# Altium footprint library AVP32F08_EVM_Rev1.1.PcbLib: 50 footprints (part 4 of 4)
Each footprint in its own frame and in the unit in brackets; x right, y up, seen from the top. Pads: shape width x height; smd on the part's side, far side on the other; paste and mask are expansions set on the pad; w line width, h text height; cw(c..) or ccw(c..) is an arc to the next point about the centre after c.
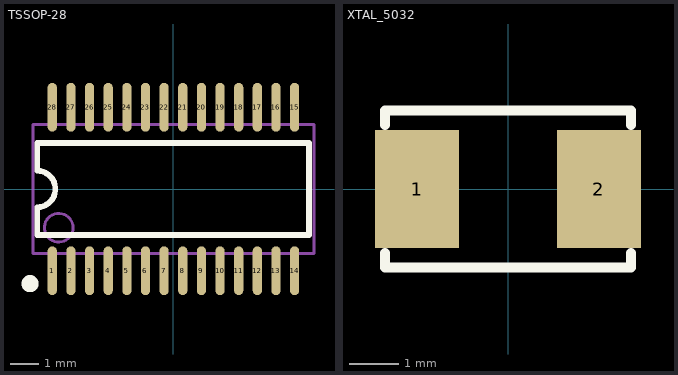
[diagram p3: the footprints below, top view; thin cyan lines are the x and y axes]

## TSSOP-28 [mm] "Wb=4,4mm, Wl=6,4mm, L=9,7mm, H=1,1mm, P=0,65"
height 8
pads (28):
  oval 0.32x1.7 smd: 1(-4.225,-2.85) 2(-3.575,-2.85) 3(-2.925,-2.85) 4(-2.275,-2.85) 5(-1.625,-2.85) 6(-0.975,-2.85) 7(-0.325,-2.85) 8(0.325,-2.85) 9(0.975,-2.85) 10(1.625,-2.85) 11(2.275,-2.85) 12(2.925,-2.85) 13(3.575,-2.85) 14(4.225,-2.85) 15(4.225,2.85) 16(3.575,2.85) 17(2.925,2.85) 18(2.275,2.85) 19(1.625,2.85) 20(0.975,2.85) 21(0.325,2.85) 22(-0.325,2.85) 23(-0.975,2.85) 24(-1.625,2.85) 25(-2.275,2.85) 26(-2.925,2.85) 27(-3.575,2.85) 28(-4.225,2.85)
Top Overlay:
  circle w0.3: c-5,-3.3 r0.15
  lines w0.2: -4.75,-0.635 ccw(c-4.75,0) -4.75,0.635
  lines w0.203: -4.75,-1.6 4.724,-1.6 4.724,1.6 -4.75,1.6 -4.75,0.65 ; -4.75,-1.587 -4.75,-0.65
Mechanical 13:
  circle w0.1: c-4,-1.35 r0.5
  lines w0.1: -4.9,-2.25 -4.9,2.25 4.9,2.25 4.9,-2.25 -4.9,-2.25
3D body "User Library-TSSOP-28.STEP": height 1.2, standoff 0, extent -4.85,-3.2 4.85,3.2

## XTAL_5032 [mm] "5032晶振"
height 1.2
pads (2):
  rect 1.7x2.4 smd: 1(-1.85,0) 2(1.85,0)
Top Overlay:
  lines w0.203: -2.5,-1.3 -2.5,-1.6 2.5,-1.6 2.5,-1.3 ; -2.5,1.3 -2.5,1.6 2.5,1.6 2.5,1.3
3D body "User Library-ABM3-1.STEP": height 1.3, standoff 0, extent -2.525,-1.549 2.475,1.651